# Altium schematic symbol library 3-282836-3.SchLib: 1 symbol
Pins are listed as number, name and electrical type; pins without a type are passive.

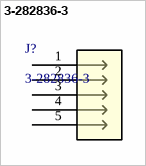
[diagram p0: symbol 3-282836-3]

## 3-282836-3
designator J?
TERMI-BLOK PCB MOUNT  90 5P Ke; Manufacturer_Name: TE Connectivity; Copyright: Copyright (C) 2026 Ultra Librarian. All rights reserved.; Manufacturer_Part_Number: 3-282836-3; RefDes: RefDes; Type: Type
footprint CONN5_3-282836-3_TEC
pins: 1, 2, 3, 4, 5